# Altium integrated library Diodos.IntLib: 8 symbols
Pins are listed as number, name and electrical type; pins without a type are passive.

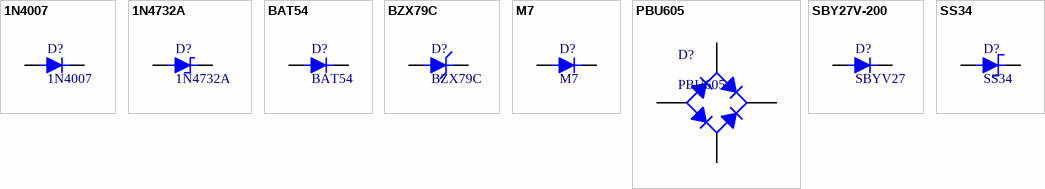
[diagram p0: symbols 1N4007 to SS34]

## 1N4007
designator D?
DO-41 SHOTKY DIODE 1A 700V
footprint DO-41-Plastic (Diode, Axial; Body 4.1 x 2.6 mm (LxDia. max), Lead Dia. 1.14 mm (max), Lead Spacing 10.16 mm; 3D Wagner Bernardo)
pins: A, K

## 1N4732A
designator D?
4,7V 1W Silicon Zener Diode; Datasheet: http://pdf.datasheetcatalog.com/datasheet_pdf/bkc-international-electronics/1N4728_to_1N973B-1.pdf
footprint DO-41-Glass (Diode, Axial; Body 4.1 x 2.6 mm (LxDia. max), Lead Dia. 0.86 mm (max), Lead Spacing 7.62 mm; 3D Julien THIEREN)
pins: A, K

## BAT54
designator D?
Diode Schottky 30V 200mA Surface Mount SOT-23-3 (TO-236)
footprint BAT54 (SOT23-3)
pins: A, K

## BZX79C
designator D?
Diodo Zener 5,6V 0,4W
footprint DO-35 (Diode, Axial; Body 3.8 x 1.9 mm (LxDia. max), Lead Dia. 0.53 mm (max), Lead Spacing 7.62 mm;)
pins: A, K

## M7
designator D?
1A Rectifier Diodes
footprint DO-214AC SMA
pins: A, K

## PBU605
designator D?
Rectifier Bridge 600V 6A
footprint Rectifier Bridge (PBU605 - 600V 6A)
pins: 1 A, 2 C, 3 C, 4 K

## SBY27V-200
designator D?, comment SBYV27
Soft Recovery Ultrafast Plastic Rectifier 200V 2A; Datasheet: https://br.mouser.com/datasheet/2/427/sbyv27-1768188.pdf
footprint DO-15 (Diode, Axial; Lead Dia. Lead Spacing 12.7 mm;)
pins: A, K

## SS34
designator D?
Surface Mount Schottky Barrier Rectifier 3A 40V; Datasheet: http://www.eletrodex.kinghost.net/Loja_Tray/Datasheets/Semicondutores/Diodos/Schottky/SS34-SS36.pdf
footprint DO-214AB SMC
pins: A, K